# Altium schematic symbol library 744878004.SchLib: 1 symbol
Pins are listed as number, name and electrical type; pins without a type are passive.

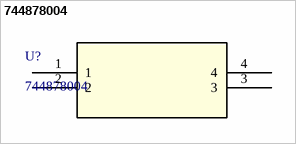
[diagram p0: symbol 744878004]

## 744878004
designator U?
SMT-Doppeldrossel WE-DD Typ "S"; Manufacturer_Name: Wurth Electronics; Copyright: Copyright (C) 2026 Ultra Librarian. All rights reserved.; Manufacturer_Part_Number: 744878004; Datasheet: https://www.we-online.com/catalog/datasheet/744878004.pdf; RefDes: RefDes; Type: Type
footprint SON_878004_WRE
pins: 1, 2, 3, 4